# Altium schematic symbol library FM25V10-G.SchLib: 1 symbol
Pins are listed as number, name and electrical type; pins without a type are passive.

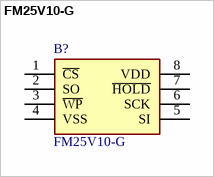
[diagram p0: symbol FM25V10-G]

## FM25V10-G
designator B?
F-RAM,128KB,SPI,40MHz,3V,SOIC8 FM25V10-G Serial-SPI FRAM Memory, 1Mbit, 2  3.6 V 8-Pin SOIC; Manufacturer_Name: Infineon; Geometry.Height: 1.727mm; Mouser Part Number: 877-FM25V10-G; Mouser Price/Stock: https://www.mouser.co.uk/ProductDetail/Infineon-Technologies/FM25V10-G?qs=pA5MXup5wxFqKGjf8NeQmw%3D%3D; Manufacturer_Part_Number: FM25V10-G; Datasheet Link: http://www.cypress.com/file/41691/download
footprint SOIC127P602X173-8N
pins: 1 ~{CS}, 2 SO, 3 ~{WP}, 4 VSS, 5 SI, 6 SCK, 7 ~{HOLD}, 8 VDD